# Altium footprint library Connectors.PcbLib: 228 footprints (part 1 of 15)
Each footprint in its own frame and in the unit in brackets; x right, y up, seen from the top. Pads: shape width x height; smd on the part's side, far side on the other; paste and mask are expansions set on the pad; w line width, h text height; cw(c..) or ccw(c..) is an arc to the next point about the centre after c.
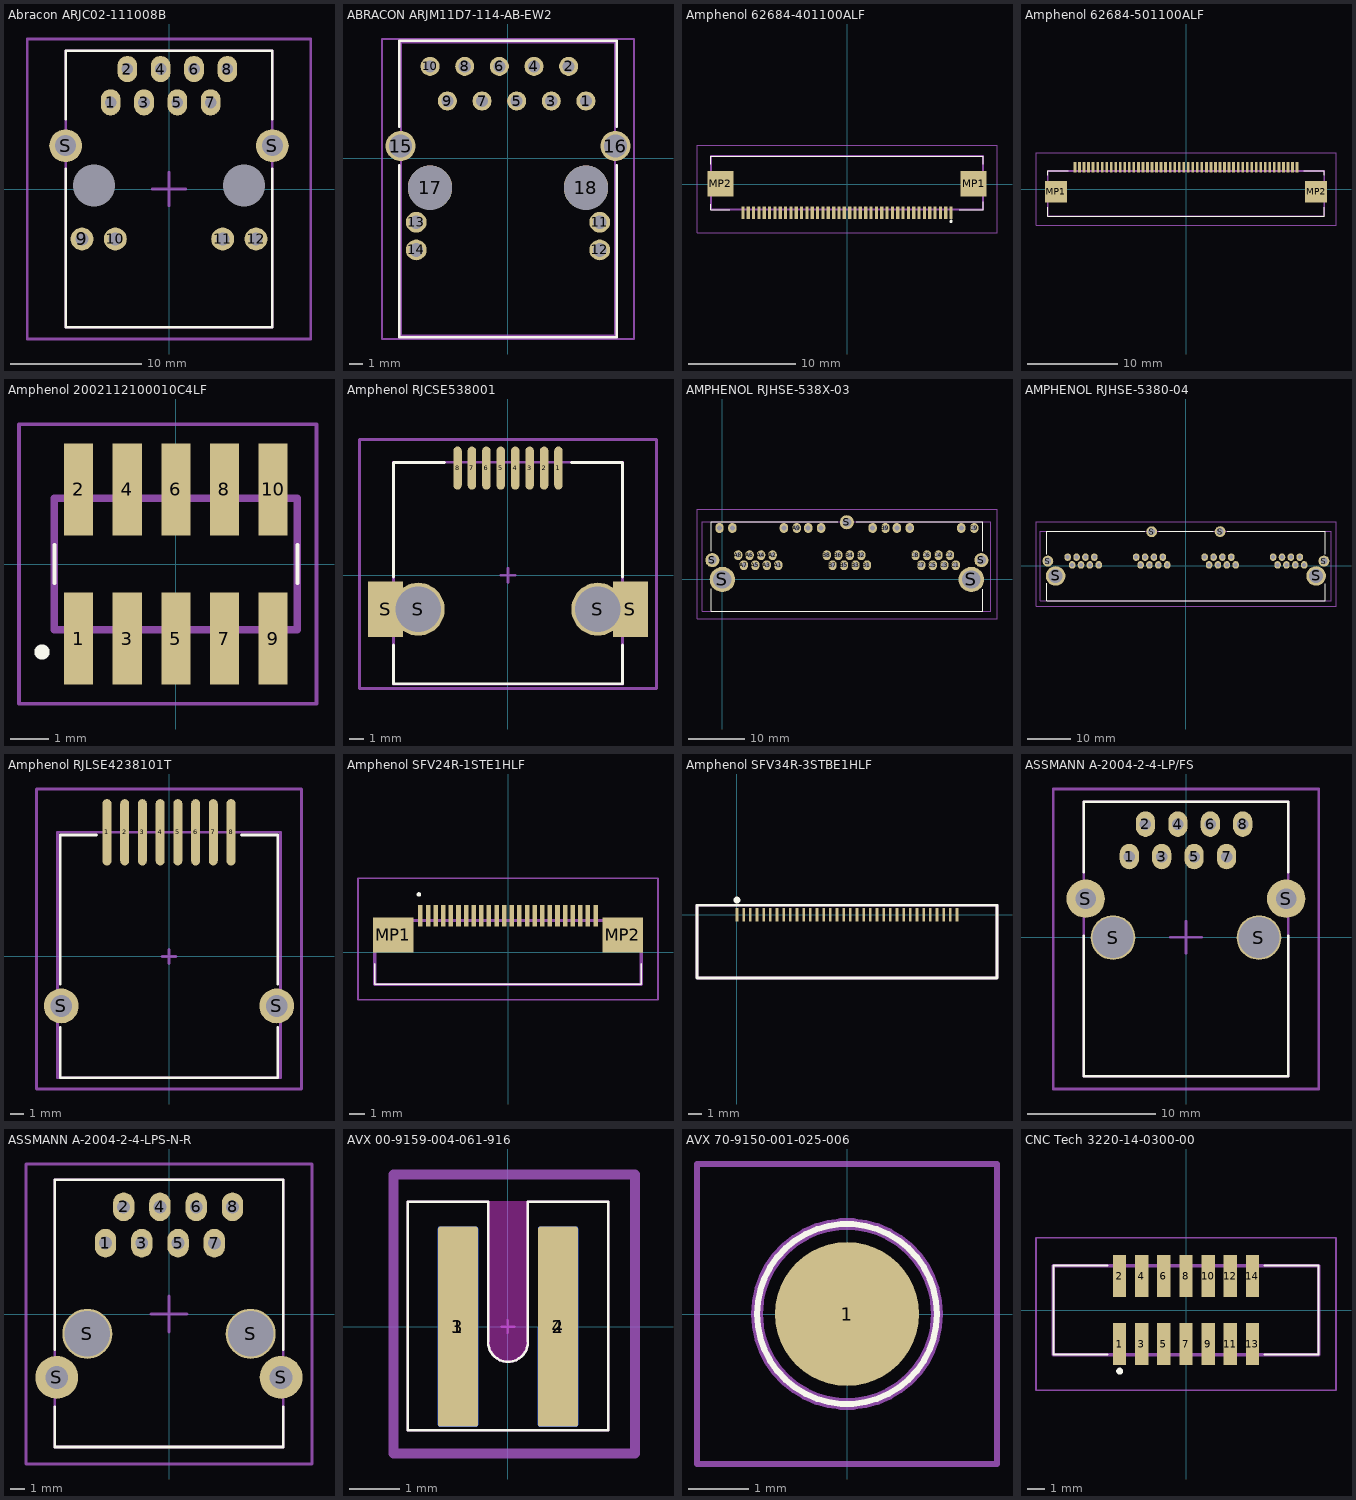
[diagram p0: the footprints below, top view; thin cyan lines are the x and y axes]

## Abracon ARJC02-111008B [mm]
height 13.55
pads (16):
  oval 1.5x2 hole 0.9: 1(-4.445,6.6) 2(-3.175,9.14) 3(-1.905,6.6) 4(-0.635,9.14) 5(0.635,6.6) 6(1.905,9.14) 7(3.175,6.6) 8(4.445,9.14)
  round 1.75 hole 1.02: 9(-6.63,-3.81) 10(-4.09,-3.81) 11(4.09,-3.81) 12(6.63,-3.81)
  round 0 hole 3.2 unplated: M(-5.715,0.25) M(5.715,0.25)
  round 2.5 hole 1.6: S(-7.875,3.3) S(7.875,3.3)
Top Overlay:
  lines w0.2: -7.874,1.52 -7.874,-10.545 0,-10.545 7.874,-10.545 7.874,1.52 ; -7.874,5.33 -7.874,10.537 0,10.537 7.874,10.537 7.874,5.33
Top Component Center:
  lines w0.2: -1.27,0 1.27,0 ; 0,-1.27 0,1.27
Top Component Outline:
  lines w0.2: -7.874,-10.545 7.874,-10.545 7.874,10.537 -7.874,10.537 -7.874,-10.545
Top Courtyard:
  lines w0.2: -10.795,-11.43 -10.795,11.43 10.795,11.43 10.795,-11.43 -10.795,-11.43
3D body "Abracon ARJC02-111008B.STEP": height 16.07, standoff -3.7, extent -10.336,-10.555 10.336,10.546

## ABRACON ARJM11D7-114-AB-EW2 [mil]
height 543.31
pads (18):
  round 55 hole 35 paste-27.5 mask+0: 1(225,164.96) 2(175,264.96) 3(125,164.96) 4(75,264.96) 5(25,164.96) 6(-25,264.96) 7(-75,164.96) 8(-125,264.96) 9(-175,164.96) 10(-225,264.96)
  round 60 hole 40 paste-30 mask+0: 11(264.76,-185.04) 12(264.76,-264.96) 13(-264.76,-185.04) 14(-264.76,-264.96)
  round 87 hole 67 paste-43.5 mask+0: 15(-310.04,35.04) 16(310.04,35.04)
  round 128 hole 128 unplated paste+0 mask+0: 17(-225,-85.04) 18(225,-85.04)
Top Overlay:
  lines w7.87: -314,-21.42 -314,-517.04 314,-517.04 314,-21.42 ; -314,91.5 -314,338.96 314,338.96 314,91.5
Top Component Outline:
  circle w20: c225,164.96 r15
  lines w5.91: -309,-512.04 -309,333.96 309,333.96 309,-512.04 -309,-512.04
Top Courtyard:
  lines w6: -363.54,-522.04 363.54,-522.04 363.54,343.96 -363.54,343.96 -363.54,-522.04
3D body "ABRACON ARJM11D7-114-AB-EW2.STEP": height 543.32, standoff -141.73, extent -313.97,-508.08 315.16,344.3

## Amphenol 62684-401100ALF [mm] "40 way 0.5 pitch FPC Connector"
height 2
pads (42):
  rect 0.3x1.2 smd: 1(9.725,-2.675) 2(9.225,-2.675) 3(8.725,-2.675) 4(8.225,-2.675) 5(7.725,-2.675) 6(7.225,-2.675) 7(6.725,-2.675) 8(6.225,-2.675) 9(5.725,-2.675) 10(5.225,-2.675) 11(4.725,-2.675) 12(4.225,-2.675) 13(3.725,-2.675) 14(3.225,-2.675) 15(2.725,-2.675) 16(2.225,-2.675) 17(1.725,-2.675) 18(1.225,-2.675) 19(0.725,-2.675) 20(0.225,-2.675) 21(-0.275,-2.675) 22(-0.775,-2.675) 23(-1.275,-2.675) 24(-1.775,-2.675) 25(-2.275,-2.675) 26(-2.775,-2.675) 27(-3.275,-2.675) 28(-3.775,-2.675) 29(-4.275,-2.675) 30(-4.775,-2.675) 31(-5.275,-2.675) 32(-5.775,-2.675) 33(-6.275,-2.675) 34(-6.775,-2.675) 35(-7.275,-2.675) 36(-7.775,-2.675) 37(-8.275,-2.675) 38(-8.775,-2.675) 39(-9.275,-2.675) 40(-9.775,-2.675)
  rect 2.4x2.4 smd: MP1(11.825,0.025) MP2(-11.875,0.025)
Top Overlay:
  lines w0.1: -12.775,-2.375 -12.775,-1.875 -12.775,-2.375 ; -12.775,-2.375 -11.025,-2.375 -12.775,-2.375 ; -12.775,2.625 -12.775,1.875 -12.775,2.625 ; -12.775,2.625 12.725,2.625 ; -12.775,2.625 12.725,2.625 ; 12.725,-2.375 12.725,-1.625 12.725,-2.375 ; 12.725,-2.375 10.475,-2.375 12.725,-2.375 ; 12.725,2.625 12.725,1.875 12.725,2.625
  lines w0.2: 9.675,-3.475 cw(c9.725,-3.475) 9.775,-3.475 ; 9.675,-3.475 ccw(c9.725,-3.475) 9.775,-3.475 ; 9.675,-3.475 cw(c9.725,-3.475) 9.775,-3.475
Top Component Outline:
  lines w0.2: -12.775,-2.375 12.725,-2.375 12.725,2.625 -12.775,2.625 -12.775,-2.375
Top Courtyard:
  lines w0.1: -14.075,-4.525 -14.075,3.625 14.025,3.625 14.025,-4.525 -14.075,-4.525
3D body "FPC-FFC OPU Series, 40 Pos 0.5 mm Pitch Connector, Side Entry, Upper Side Contact.stp": height 2, standoff -0.05, extent -12.775,-3.025 12.725,2.575

## Amphenol 62684-501100ALF [mm] "50 way 0.5 pitch FPC Connector"
height 2
pads (52):
  rect 0.3x1.2 smd: 1(-12.25,2.4) 2(-11.75,2.4) 3(-11.25,2.4) 4(-10.75,2.4) 5(-10.25,2.4) 6(-9.75,2.4) 7(-9.25,2.4) 8(-8.75,2.4) 9(-8.25,2.4) 10(-7.75,2.4) 11(-7.25,2.4) 12(-6.75,2.4) 13(-6.25,2.4) 14(-5.75,2.4) 15(-5.25,2.4) 16(-4.75,2.4) 17(-4.25,2.4) 18(-3.75,2.4) 19(-3.25,2.4) 20(-2.75,2.4) 21(-2.25,2.4) 22(-1.75,2.4) 23(-1.25,2.4) 24(-0.75,2.4) 25(-0.25,2.4) 26(0.25,2.4) 27(0.75,2.4) 28(1.25,2.4) 29(1.75,2.4) 30(2.25,2.4) 31(2.75,2.4) 32(3.25,2.4) 33(3.75,2.4) 34(4.25,2.4) 35(4.75,2.4) 36(5.25,2.4) 37(5.75,2.4) 38(6.25,2.4) 39(6.75,2.4) 40(7.25,2.4) 41(7.75,2.4) 42(8.25,2.4) 43(8.75,2.4) 44(9.25,2.4) 45(9.75,2.4) 46(10.25,2.4) 47(10.75,2.4) 48(11.25,2.4) 49(11.75,2.4) 50(12.25,2.4)
  rect 2.4x2.4 smd: MP1(-14.35,-0.3) MP2(14.35,-0.3)
Top Overlay:
  lines w0.1: -15.25,-2 -15.25,-3 15.25,-3 15.25,-2 ; -15.25,1.5 -15.25,2 -13,2 ; 13,2 15.25,2 15.25,1.5
Top Component Outline:
  lines w0.2: -15.25,-3 15.25,-3 15.25,2 -15.25,2 -15.25,-3
Top Courtyard:
  lines w0.1: -16.55,-4 16.55,-4 16.55,4 -16.55,4 -16.55,-4
3D body "s62684_501100alf.stp": height 2.05, standoff -0.01, extent -15.25,-2.5 15.25,3.14

## Amphenol 2002112100010C4LF [mm]
pads (10):
  rect 0.76x2.4 smd: 1(-2.54,-1.95) 2(-2.54,1.95) 3(-1.27,-1.95) 4(-1.27,1.95) 5(0,-1.95) 6(0,1.95) 7(1.27,-1.95) 8(1.27,1.95) 9(2.54,-1.95) 10(2.54,1.95)
Top Overlay:
  lines w0.1: -3.175,-0.5 -3.175,0.5 ; 3.175,-0.5 3.175,0.5
  lines w0.2: -3.5,-2.4 ccw(c-3.5,-2.3) -3.5,-2.2 ccw(c-3.5,-2.3) -3.5,-2.4
Top Component Outline:
  lines w0.2: -3.175,-1.715 3.175,-1.715 3.175,1.715 -3.175,1.715 -3.175,-1.715
Top Courtyard:
  lines w0.1: -4.1,-3.65 3.675,-3.65 3.675,3.65 -4.1,3.65 -4.1,-3.65

## Amphenol RJCSE538001 [mm]
height 13.46
pads (12):
  oval 0.6x3.05 smd: 1(3.57,7.58) 2(2.55,7.58) 3(1.53,7.58) 4(0.51,7.58) 5(-0.51,7.58) 6(-1.53,7.58) 7(-2.55,7.58) 8(-3.57,7.58)
  rect 2.5x3.9 smd: S(-8.66,-2.4) S(8.66,-2.4)
  round 3.75 hole 3.25: S(-6.35,-2.4) S(6.35,-2.4)
Top Overlay:
  lines w0.2: -8.1,-4.92 -8.1,-7.67 0,-7.67 8.1,-7.67 8.1,-4.92 ; -8.1,-0.12 -8.1,7.98 -4.5,7.98 ; 4.5,7.98 8.1,7.98 8.1,-0.12
Top Component Outline:
  lines w0.2: -8.1,-7.7 8.1,-7.7 8.1,8 -8.1,8 -8.1,-7.7
Top Courtyard:
  lines w0.2: -0.5,0 0.5,0 ; 0,-0.5 0,0.5 ; -10.5,-8 -10.5,9.6 10.5,9.6 10.5,-8 -10.5,-8
3D body "Amphenol RJCSE538001.STEP": height 14.77, standoff -1.27, extent -9.43,-7.66 9.43,8.875

## AMPHENOL RJHSE-538X-03 [mm]
height 13.46
pads (41):
  oval 1.5x1.75 hole 0.9: A1(9.93,2.54) A2(8.91,4.32) A3(7.89,2.54) A4(6.87,4.32) A5(5.85,2.54) A6(4.83,4.32) A7(3.81,2.54) A8(2.79,4.32) A9(13.21,9.14) A10(10.92,9.14) A11(1.78,9.14) A12(-0.51,9.14) B1(25.68,2.54) B2(24.66,4.32) B3(23.64,2.54) B4(22.62,4.32) B5(21.6,2.54) B6(20.58,4.32) B7(19.56,2.54) B8(18.54,4.32) B9(28.96,9.14) B10(26.67,9.14) B11(17.53,9.14) B12(15.24,9.14) C1(41.43,2.54) C2(40.41,4.32) C3(39.39,2.54) C4(38.37,4.32) C5(37.35,2.54) C6(36.33,4.32) C7(35.31,2.54) C8(34.29,4.32) C9(44.71,9.14) C10(42.42,9.14) C11(33.28,9.14) C12(30.99,9.14)
  round 2.5 hole 1.57: S(-1.78,3.43) S(22.1,10.16) S(45.98,3.43)
  round 4.5 hole 3.25: S(0,0) S(44.2,0)
Top Overlay:
  lines w0.2: -2,-1.675 -2,-5.65 46.25,-5.65 ; -2,5 -2,10.25 20.5,10.25 ; 23.75,10.25 46.25,10.25 ; 46.26,-5.65 46.26,-1.75 ; 46.26,5 46.26,10.25 ; 20.5,10.25 20.5,10.25
Board:
  lines w0.2: 47.67,10.25 -3.525,10.25 -3.525,-5.65 47.686,-5.65 47.686,10.235
Top Courtyard:
  lines w0.2: -4.5,-7 48.76,-7 48.76,12.5 -4.5,12.5 -4.5,-7
3D body "Amphenol RJHSE-538X-03-REVT1.STEP": height 14.47, standoff -4.44, extent -3.345,-6.108 47.825,10.481

## AMPHENOL RJHSE-5380-04 [mm]
height 13.46
pads (38):
  oval 1.5x1.75 hole 0.9: A1(-20.04,0.24) A2(-21.06,2.02) A3(-22.08,0.24) A4(-23.1,2.02) A5(-24.12,0.24) A6(-25.14,2.02) A7(-26.16,0.24) A8(-27.18,2.02) B1(-4.29,0.24) B2(-5.31,2.02) B3(-6.33,0.24) B4(-7.35,2.02) B5(-8.37,0.24) B6(-9.39,2.02) B7(-10.41,0.24) B8(-11.43,2.02) C1(11.46,0.24) C2(10.44,2.02) C3(9.42,0.24) C4(8.4,2.02) C5(7.38,0.24) C6(6.36,2.02) C7(5.34,0.24) C8(4.32,2.02) D1(27.21,0.24) D2(26.19,2.02) D3(25.17,0.24) D4(24.15,2.02) D5(23.13,0.24) D6(22.11,2.02) D7(21.09,0.24) D8(20.07,2.02)
  round 2.5 hole 1.57: S(-31.75,1.13) S(-7.87,7.86) S(7.88,7.89) S(31.75,1.13)
  round 4.5 hole 3.25: S(-29.97,-2.3) S(29.97,-2.3)
Top Overlay:
  lines w0.2: -31.97,-3.975 -31.97,-7.95 32.03,-7.95 32.03,-4.05 ; -31.97,2.7 -31.97,7.95 -9.47,7.95 ; -6.22,7.95 6.28,7.95 ; 9.53,7.95 32.03,7.95 ; 32.03,2.7 32.03,7.95 ; -9.47,7.95 -9.47,7.95 ; 32.03,7.95 32.03,7.95
Board:
  lines w0.2: -33.495,-7.95 33.456,-7.95 33.456,7.95 -33.495,7.95 -33.495,-7.95
Top Courtyard:
  lines w0.2: -34.47,-9.3 34.53,-9.3 34.53,10.2 -34.47,10.2 -34.47,-9.3
3D body "Amphenol RJHSE-5380-04-REVT1.STEP": height 14.68, standoff -4.17, extent -33.47,-8 33.481,7.9

## Amphenol RJLSE4238101T [mm] "Surface mount modular jack with shield"
height 11.93
pads (10):
  oval 0.64x4.75 smd: 1(-4.445,8.9) 2(-3.175,8.9) 3(-1.905,8.9) 4(-0.635,8.9) 5(0.635,8.9) 6(1.905,8.9) 7(3.175,8.9) 8(4.445,8.9)
  round 2.5 hole 1.57: S(-7.72,-3.545) S(7.72,-3.545)
Top Overlay:
  lines w0.2: -7.8,-5.1 -7.8,-8.7 0.6,-8.7 7.8,-8.7 7.8,-5.1 ; -7.8,-2 -7.8,8.7 -5.2,8.7 ; 5.2,8.7 7.8,8.7 7.8,-2
Top Component Outline:
  lines w0.2: -8,-8.7 -8,8.9 8,8.9 8,-8.7 -8,-8.7
Top Courtyard:
  lines w0.2: -0.5,0 0.5,0 ; 0,-0.5 0,0.5 ; -9.5,-9.5 -9.5,12 9.5,12 9.5,-9.5 0,-9.5 -9.5,-9.5
3D body "Amphenol RJLSE4238101T.STEP": height 11.76, standoff -2.19, extent -8.051,-8.701 8.049,9.863

## Amphenol SFV24R-1STE1HLF [mm]
pads (26):
  rect 0.3x1.4 smd: 1(-5.75,2.4) 2(-5.25,2.4) 3(-4.75,2.4) 4(-4.25,2.4) 5(-3.75,2.4) 6(-3.25,2.4) 7(-2.75,2.4) 8(-2.25,2.4) 9(-1.75,2.4) 10(-1.25,2.4) 11(-0.75,2.4) 12(-0.25,2.4) 13(0.25,2.4) 14(0.75,2.4) 15(1.25,2.4) 16(1.75,2.4) 17(2.25,2.4) 18(2.75,2.4) 19(3.25,2.4) 20(3.75,2.4) 21(4.25,2.4) 22(4.75,2.4) 23(5.25,2.4) 24(5.75,2.4)
  rect 2.65x2.3 smd: MP1(-7.525,1.15) MP2(7.525,1.15)
Top Overlay:
  lines w0.1: -8.75,-2.1 -8.75,-0.75 -8.75,-2.1 ; -8.75,-2.1 8.75,-2.1 ; -8.75,-2.1 8.75,-2.1 ; 8.75,-2.1 8.75,-0.75 8.75,-2.1
  lines w0.2: -5.9,3.8 ccw(c-5.85,3.8) -5.8,3.8 ; -5.9,3.8 cw(c-5.85,3.8) -5.8,3.8 ; -5.9,3.8 ccw(c-5.85,3.8) -5.8,3.8
Top Component Outline:
  lines w0.2: -8.75,-2.1 8.75,-2.1 8.75,2.1 -8.75,2.1 -8.75,-2.1
Top Courtyard:
  lines w0.1: -9.85,-3.1 9.85,-3.1 9.85,4.85 -9.85,4.85 -9.85,-3.1
3D body "Amphenol SFV24R.stp": height 1.85, standoff -0.02, extent -8.775,-2.1 8.725,2.8

## Amphenol SFV34R-3STBE1HLF [mm] "34 way 0.5 pitch FPC Connector"
height 1
pads (34):
  rect 0.2x1 smd: 1(0,0) 2(0.5,0) 3(1,0) 4(1.5,0) 5(2,0) 6(2.5,0) 7(3,0) 8(3.5,0) 9(4,0) 10(4.5,0) 11(5,0) 12(5.5,0) 13(6,0) 14(6.5,0) 15(7,0) 16(7.5,0) 17(8,0) 18(8.5,0) 19(9,0) 20(9.5,0) 21(10,0) 22(10.5,0) 23(11,0) 24(11.5,0) 25(12,0) 26(12.5,0) 27(13,0) 28(13.5,0) 29(14,0) 30(14.5,0) 31(15,0) 32(15.5,0) 33(16,0) 34(16.5,0)
Top Overlay:
  circle w0.5: c-0.01,1.1 r0.01
  lines w0.2: -3,-4.75 -3,0.7 19.5,0.7 19.5,-4.75 -3,-4.75
Top Component Outline:
  lines w0.2: -3,-4.75 -3,0.7 19.5,0.7 19.5,-4.75 -3,-4.75
Top Courtyard:
  lines w0.2: -3,-4.75 19.5,-4.75 19.5,0.7 -3,0.7 -3,-4.75
3D body "Amphenol  SFV34R-3STBE1HLF.STP": height 1.85, standoff -0.02, extent -3,-4.55 19.5,0.35

## ASSMANN A-2004-2-4-LP/FS [mm]
height 13.3
pads (12):
  oval 1.5x2 hole 0.9: 1(-4.445,6.31) 2(-3.175,8.85) 3(-1.905,6.31) 4(-0.635,8.85) 5(0.635,6.31) 6(1.905,8.85) 7(3.175,6.31) 8(4.445,8.85)
  round 3 hole 1.6: S(-7.855,3.01) S(7.845,3.01)
  round 3.5 hole 3.2: S(-5.715,-0.04) S(5.715,-0.04)
Top Overlay:
  lines w0.2: -8,0.1 -8,-10.9 8,-10.9 8,0.1 ; -8,5.1 -8,10.6 8,10.6 8,5.1
Board:
  lines w0.2: -8,-10.9 8,-10.9 8,10.6 -8,10.6 -8,-10.9
Top Courtyard:
  lines w0.2: -1.25,0 1.25,0 ; 0,-1.25 0,1.25 ; -10.4,-11.9 -10.4,11.6 10.4,11.6 10.4,-11.9 -10.4,-11.9
3D body "ASSMANN A-2004-2-4-LPFS-N-R.STEP": height 13.6, standoff -3.5, extent -8,-10.9 8,10.6

## ASSMANN A-2004-2-4-LPS-N-R [mm]
height 13.3
pads (12):
  oval 1.5x2 hole 0.9: 1(-4.445,4.96) 2(-3.175,7.5) 3(-1.905,4.96) 4(-0.635,7.5) 5(0.635,4.96) 6(1.905,7.5) 7(3.175,4.96) 8(4.445,7.5)
  round 3 hole 1.6: S(-7.855,-4.44) S(7.845,-4.44)
  round 3.5 hole 3.2: S(-5.715,-1.39) S(5.715,-1.39)
Top Overlay:
  lines w0.2: -8,-6.5 -8,-9.3 8,-9.3 8,-6.5 ; -8,-2.5 -8,9.4 8,9.4 8,-2.5
Board:
  lines w0.2: -8,-9.3 8,-9.3 8,9.4 -8,9.4 -8,-9.3
Top Courtyard:
  lines w0.2: -1.25,0 1.25,0 ; 0,-1.25 0,1.25 ; -10,-10.5 10,-10.5 10,10.5 -10,10.5 -10,-10.5
3D body "ASSMANN A-2004-2-4-LPS-N-R.STEP": height 13.3, standoff -3.5, extent -8,-9.3 8,9.4

## AVX 00-9159-004-061-916 [mm] "PEN ENDED CARD EDGE 4 POS"
pads (4):
  rrect10% 0.8x4 smd mask+0: 1(-1,0) 2(1,0)
  rrect10% 0.8x4 smd far side mask+0: 3(-1,0) 4(1,0)
Top Overlay:
  lines w0.05: -2,-2.072 2,-2.072 2,2.5 0.4,2.5 0.4,-0.3 cw(c0,-0.3) -0.4,-0.3 -0.4,2.5 -2,2.5 -2,-2.072
Keep-Out Layer:
  board cut-out: -0.4,2.512 -0.4,-0.313 -0.395,-0.391 -0.327,-0.534 -0.211,-0.64 -0.062,-0.694 0.016,-0.691 0.093,-0.691 0.234,-0.633 0.342,-0.525 0.4,-0.384 0.4,-0.308 0.4,2.512
Top Component Outline:
  lines w0.05: -2,-2.072 -2,2.5 -0.4,2.5 -0.4,-0.3 ccw(c0,-0.3) 0.4,-0.3 0.4,2.5 2,2.5 2,-2.072 -2,-2.072
Top Courtyard:
  lines w0.05: -0.125,0 0.125,0 ; 0,-0.125 0,0.125
  lines w0.2: -2.286,-2.54 -2.286,3.048 2.54,3.048 2.54,-2.54 -2.286,-2.54
Multi-Layer:
  pour cut-out: -0.813,2.515 -0.813,-0.309 -0.813,-0.388 -0.782,-0.543 -0.722,-0.688 -0.634,-0.819 -0.523,-0.931 -0.392,-1.018 -0.246,-1.079 -0.092,-1.11 -0.013,-1.11 0.066,-1.11 0.221,-1.079 0.366,-1.018 0.497,-0.931 0.609,-0.819 0.696,-0.688 0.756,-0.543 0.787,-0.388 0.787,-0.31 0.787,2.515
3D body "AVX-00-9159-004-061-916.STEP": height 2.5, standoff -2.5, extent -1.95,-0.7 1.95,9.3

## AVX 70-9150-001-025-006 [mm] "Pogo Pin Single Contact: 70-9150-BTB"
pads (1):
  round 2.4 smd: 1(0,0)
Top Overlay:
  lines w0.1: -1.5,0 ccw(c0,0) 1.5,0 ccw(c0,0) -1.5,0
Top Component Outline:
  lines w0.2: -1.5,0 ccw(c0,0) 1.5,0 ccw(c0,0) -1.5,0
Top Courtyard:
  lines w0.1: -2.5,-2.5 2.5,-2.5 2.5,2.5 -2.5,2.5 -2.5,-2.5
3D body "AVX-70-9150-001-025-006.STEP": height 3.07, standoff -0.03, extent -0.993,-1 0.993,1

## CNC Tech 3220-14-0300-00 [mm]
pads (14):
  rect 0.76x2.4 smd: 1(-3.81,-1.95) 2(-3.81,1.95) 3(-2.54,-1.95) 4(-2.54,1.95) 5(-1.27,-1.95) 6(-1.27,1.95) 7(0,-1.95) 8(0,1.95) 9(1.27,-1.95) 10(1.27,1.95) 11(2.54,-1.95) 12(2.54,1.95) 13(3.81,-1.95) 14(3.81,1.95)
Top Overlay:
  lines w0.1: -4.5,-2.55 -7.595,-2.55 -7.595,2.55 -4.5,2.55 ; 4.5,-2.55 7.595,-2.55 7.595,-2.5 7.595,2.55 4.5,2.55
  lines w0.2: -3.9,-3.5 cw(c-3.8,-3.5) -3.7,-3.5 cw(c-3.8,-3.5) -3.9,-3.5
Top Component Outline:
  lines w0.2: -7.595,-2.55 7.595,-2.55 7.595,2.55 -7.595,2.55 -7.595,-2.55
Top Courtyard:
  lines w0.1: -8.595,-4.6 8.595,-4.6 8.595,4.15 -8.595,4.15 -8.595,-4.6
3D body "3220-14-0300.STEP": height 5.4, standoff -0.2, extent -7.595,-2.75 7.595,2.75